# Altium footprint library Footprint.PcbLib: 154 footprints (part 1 of 10)
Each footprint in its own frame and in the unit in brackets; x right, y up, seen from the top. Pads: shape width x height; smd on the part's side, far side on the other; paste and mask are expansions set on the pad; w line width, h text height; cw(c..) or ccw(c..) is an arc to the next point about the centre after c.
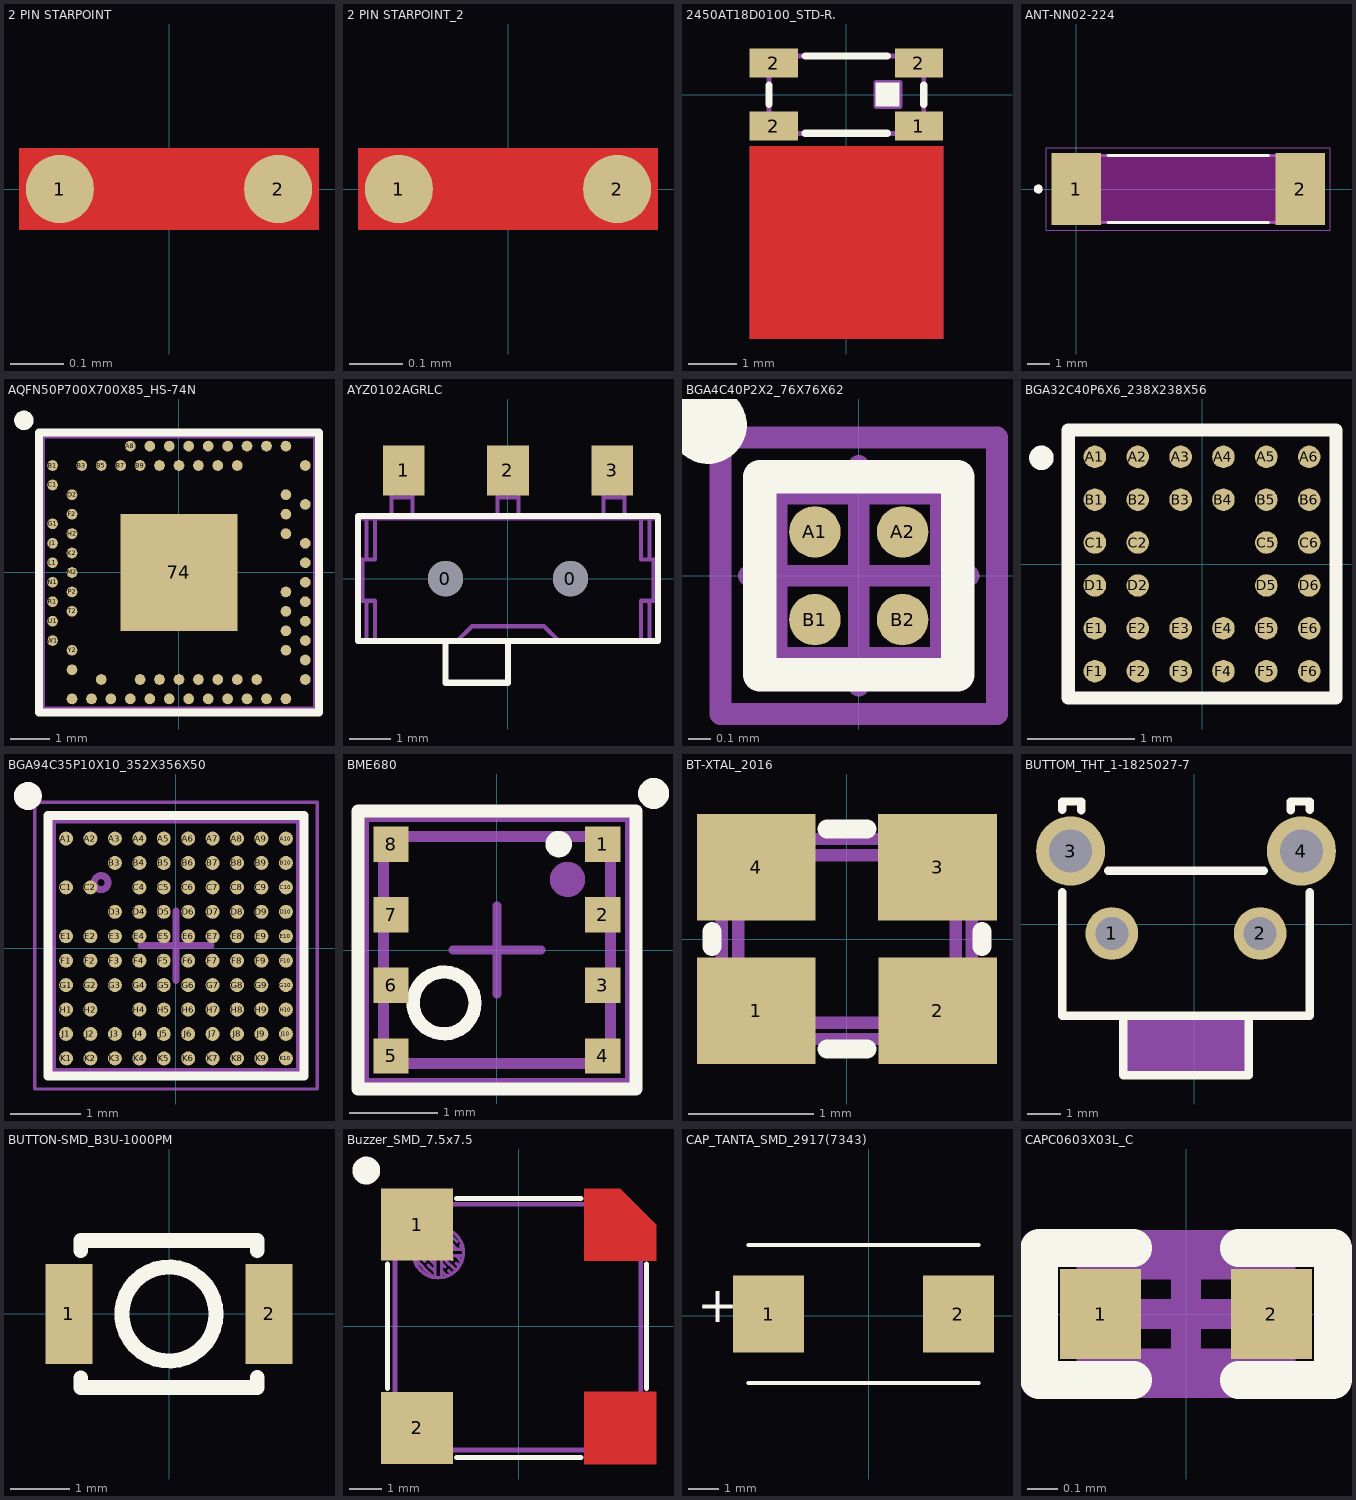
[diagram p0: the footprints below, top view; thin cyan lines are the x and y axes]

## 2 PIN STARPOINT [mil]
pads (2):
  round 5 smd paste-3 mask-3: 1(-8,0) 2(8,0)
Top Layer:
  rectangle: -11,-3 11,3

## 2 PIN STARPOINT_2 [mil]
pads (2):
  round 5 smd paste-3 mask-3: 1(-8,0) 2(8,0)
Top Layer:
  rectangle: -11,-3 11,3

## 2450AT18D0100_STD-R. [mm]
pads (4):
  rect 1x0.6 smd mask+0.051: 1(1.5,-0.65) 2(-1.5,-0.65) 2(-1.5,0.65) 2(1.5,0.65)
Top Layer:
  pour cut-out: 2,-5.05 2,-1.067 -2,-1.067 -2,-5.05
Mid-Layer 1:
  pour cut-out: 2.025,-5.05 2.025,-1.067 -1.975,-1.067 -1.975,-5.05
Mid-Layer 2:
  pour cut-out: 2.025,-5.05 2.025,-1.067 -1.975,-1.067 -1.975,-5.05
Bottom Layer:
  pour cut-out: 2,-5.05 2,-1.067 -2,-1.067 -2,-5.05
Top Overlay:
  region: 1.1,0.25 0.6,0.25 0.6,-0.25 1.1,-0.25
  lines w0.15: -1.6,-0.2 -1.6,0.2 ; -0.85,-0.8 0.85,-0.8 ; -0.85,0.8 0.85,0.8 ; 1.6,-0.2 1.6,0.2
Mechanical 7:
  lines w0.1: -1.6,-0.5 -1.1,-0.5 -1.1,-0.8 ; -1.6,0.5 -1.1,0.5 -1.1,0.8 ; 1.1,-0.8 1.1,-0.5 1.6,-0.5 ; 1.1,0.8 1.1,0.5 1.6,0.5 ; -1.6,-0.8 1.6,-0.8 1.6,0.8 -1.6,0.8 -1.6,-0.8 ; 0.607,-0.247 0.607,0.252 1.106,0.252 1.106,-0.247 0.607,-0.247
  text ".Designator" at -0.908,-0.2 h0.38
3D body: height 1.2, standoff 0, extent 1.105,0.505 1.605,0.805
3D body: height 1.2, standoff 0, extent -1.605,-0.805 -1.105,-0.505
3D body: height 1.2, standoff 0, extent -1.605,0.505 -1.105,0.805
3D body: height 1.2, standoff 0, extent -1.6,-0.8 1.6,0.8
3D body: height 1.2, standoff 0, extent 1.105,-0.805 1.605,-0.505
3D body: height 1.2, standoff 0.01, extent 0.6,-0.25 1.099,0.25

## ANT-NN02-224 [mm]
pads (2):
  rect 2.2x3.2 smd: 1(0,0) 2(10,0)
Top Overlay:
  circle w0.2: c-1.7,0 r0.1
  lines w0.127: 1.413,-1.5 8.587,-1.5 ; 1.413,1.5 8.587,1.5
Keep-Out Layer:
  region: 8.9,-1.5 1.1,-1.5 1.1,1.5 8.9,1.5
  region: 8.9,-1.5 1.1,-1.5 1.1,1.5 8.9,1.5
Mechanical 13:
  circle w0.2: c-1.7,0 r0.1
  lines w0.127: -1,-1.5 11,-1.5 11,1.5 -1,1.5 -1,-1.5
Mechanical 15:
  lines w0.05: -1.35,-1.85 11.35,-1.85 11.35,1.85 -1.35,1.85 -1.35,-1.85
3D body "step_temp.STEP": height 2.41, standoff 0, extent -1,-1.5 11,1.5

## AQFN50P700X700X85_HS-74N [mm]
pads (74):
  rect 3x3 smd mask+0.05: 74(0,0)
  round 0.275 smd paste+0.012 mask+0.05: A8(-1.25,3.25) A10(-0.75,3.25) A12(-0.25,3.25) A14(0.25,3.25) A16(0.75,3.25) A18(1.25,3.25) A20(1.75,3.25) A22(2.25,3.25) A23(2.75,3.25) AA24(3.25,-2.25) AB2(-2.75,-2.5) AC5(-2,-2.75) AC9(-1,-2.75) AC11(-0.5,-2.75) AC13(0,-2.75) AC15(0.5,-2.75) AC17(1,-2.75) AC19(1.5,-2.75) AC21(2,-2.75) AC24(3.25,-2.75) AD2(-2.75,-3.25) AD4(-2.25,-3.25) AD6(-1.75,-3.25) AD8(-1.25,-3.25) AD10(-0.75,-3.25) AD12(-0.25,-3.25) AD14(0.25,-3.25) AD16(0.75,-3.25) AD18(1.25,-3.25) AD20(1.75,-3.25) AD22(2.25,-3.25) AD23(2.75,-3.25) B1(-3.25,2.75) B3(-2.5,2.75) B5(-2,2.75) B7(-1.5,2.75) B9(-1,2.75) B11(-0.5,2.75) B13(0,2.75) B15(0.5,2.75) B17(1,2.75) B19(1.5,2.75) B24(3.25,2.75) C1(-3.25,2.25) D2(-2.75,2) D23(2.75,2) E24(3.25,1.75) F2(-2.75,1.5) F23(2.75,1.5) G1(-3.25,1.25) H2(-2.75,1) H23(2.75,1) J1(-3.25,0.75) J24(3.25,0.75) K2(-2.75,0.5) L1(-3.25,0.25) L24(3.25,0.25) M2(-2.75,0) N1(-3.25,-0.25) N24(3.25,-0.25) P2(-2.75,-0.5) P23(2.75,-0.5) R1(-3.25,-0.75) R24(3.25,-0.75) T2(-2.75,-1) T23(2.75,-1) U1(-3.25,-1.25) U24(3.25,-1.25) V23(2.75,-1.5) W1(-3.25,-1.75) W24(3.25,-1.75) Y2(-2.75,-2) Y23(2.75,-2)
Top Overlay:
  circle w0.25: c-3.988,3.912 r0.125
  lines w0.2: -3.6,-3.6 3.6,-3.6 3.6,3.6 -3.6,3.6 -3.6,-3.6
Mechanical 7:
  lines w0.1: -3.5,-3.5 -3.5,3.5 3.5,3.5 3.5,-3.5 -3.5,-3.5
3D body "LGA88C25P25X25_700X700X85.step": height 0.85, standoff 0, extent -3.55,-3.55 3.55,3.55

## AYZ0102AGRLC [mm]
pads (5):
  round 0.85 hole 0.85 unplated: 0(-1.5,0) 0(1.5,0)
  rect 1x1.2 smd: 1(-2.5,2.6) 2(0,2.6) 3(2.5,2.6)
Top Overlay:
  lines w0.15: -1.5,-1.5 -1.5,-2.5 0,-2.5 0,-1.5 ; -3.6,-1.5 -3.6,1.5 3.6,1.5 3.6,-1.5 -3.6,-1.5
Mechanical 7:
  lines w0.1: -3.395,-1.52 -3.395,-0.531 ; -3.395,0.457 -3.395,1.445 ; -3.191,-1.52 -3.191,-0.531 -3.497,-0.531 ; -3.191,1.445 -3.191,0.457 -3.497,0.457 ; -2.797,1.445 -2.797,2.727 -2.288,2.727 -2.288,1.445 ; -2.797,1.948 -2.288,1.948 ; -1.5,-1.52 -1.5,-2.5 0.001,-2.5 0.001,-1.52 ; -1.246,-1.52 -0.864,-1.143 0.866,-1.143 1.247,-1.52 ; -0.253,1.445 -0.253,2.727 0.255,2.727 0.255,1.445 ; -0.253,1.948 0.255,1.948 ; 2.291,1.445 2.291,2.727 2.799,2.727 2.799,1.445 ; 2.291,1.948 2.799,1.948 ; 3.193,-1.52 3.193,-0.531 3.499,-0.531 ; 3.193,1.445 3.193,0.457 3.499,0.457 ; 3.397,-1.52 3.397,-0.531 ; 3.397,0.457 3.397,1.445 ; -3.497,-0.531 -3.599,-0.531 -3.599,-1.52 3.6,-1.52 3.6,-0.531 3.499,-0.531 ; -3.497,-0.531 -3.497,0.457 ; -3.497,0.457 -3.599,0.457 -3.599,1.445 3.6,1.445 3.6,0.457 3.499,0.457 ; 3.499,-0.531 3.499,0.457
  text ".Designator" at -1.125,-0.15 h0.38
3D body "AYZ0102AGRLC.step": height 1.5, standoff -0.5, extent -3.6,-2.5 3.6,2.8

## BGA4C40P2X2_76X76X62 [mm]
pads (4):
  round 0.235 smd mask+0.05: A1(-0.2,0.2) A2(0.2,0.2) B1(-0.2,-0.2) B2(0.2,-0.2)
Top Overlay:
  circle w0.254: c-0.687,0.687 r0.05
  lines w0.152: -0.451,-0.451 -0.451,0.451 0.451,0.451 0.451,-0.451 -0.451,-0.451
Mechanical 7:
  circle w0.127: c-0.2,0.2 r0.051
  lines w0.1: -0.375,-0.375 0.375,-0.375 0.375,0.375 -0.375,0.375 -0.375,-0.375
  text ".Designator" at -0.374,0.505 h0.38
Mechanical 15:
  lines w0.1: -0.5,0 0.5,0 ; 0,-0.5 0,0.5 ; -0.63,-0.63 0.63,-0.63 0.63,0.63 -0.63,0.63 -0.63,-0.63
3D body "TCK106AG,LF.step": height 0.55, standoff 0, extent -0.395,-0.395 0.395,0.395

## BGA32C40P6X6_238X238X56 [mm]
pads (32):
  round 0.21 smd mask+0.03: A1(-1,1) A2(-0.6,1) A3(-0.2,1) A4(0.2,1) A5(0.6,1) A6(1,1) B1(-1,0.6) B2(-0.6,0.6) B3(-0.2,0.6) B4(0.2,0.6) B5(0.6,0.6) B6(1,0.6) C1(-1,0.2) C2(-0.6,0.2) C5(0.6,0.2) C6(1,0.2) D1(-1,-0.2) D2(-0.6,-0.2) D5(0.6,-0.2) D6(1,-0.2) E1(-1,-0.6) E2(-0.6,-0.6) E3(-0.2,-0.6) E4(0.2,-0.6) E5(0.6,-0.6) E6(1,-0.6) F1(-1,-1) F2(-0.6,-1) F3(-0.2,-1) F4(0.2,-1) F5(0.6,-1) F6(1,-1)
Top Overlay:
  circle w0.127: c-1.499,0.991 r0.051
  lines w0.125: -1.25,-1.25 1.25,-1.25 1.25,1.25 -1.25,1.25 -1.25,-1.25
3D body "BGA32C40P6X6_238X238X56.step": height 0.56, standoff 0, extent -1.19,-1.19 1.19,1.19

## BGA94C35P10X10_352X356X50 [mm]
pads (94):
  round 0.2 smd mask+0.04: A1(-1.575,1.575) A2(-1.225,1.575) A3(-0.875,1.575) A4(-0.525,1.575) A5(-0.175,1.575) A6(0.175,1.575) A7(0.525,1.575) A8(0.875,1.575) A9(1.225,1.575) A10(1.575,1.575) B3(-0.875,1.225) B4(-0.525,1.225) B5(-0.175,1.225) B6(0.175,1.225) B7(0.525,1.225) B8(0.875,1.225) B9(1.225,1.225) B10(1.575,1.225) C1(-1.575,0.875) C2(-1.225,0.875) C4(-0.525,0.875) C5(-0.175,0.875) C6(0.175,0.875) C7(0.525,0.875) C8(0.875,0.875) C9(1.225,0.875) C10(1.575,0.875) D3(-0.875,0.525) D4(-0.525,0.525) D5(-0.175,0.525) D6(0.175,0.525) D7(0.525,0.525) D8(0.875,0.525) D9(1.225,0.525) D10(1.575,0.525) E1(-1.575,0.175) E2(-1.225,0.175) E3(-0.875,0.175) E4(-0.525,0.175) E5(-0.175,0.175) E6(0.175,0.175) E7(0.525,0.175) E8(0.875,0.175) E9(1.225,0.175) E10(1.575,0.175) F1(-1.575,-0.175) F2(-1.225,-0.175) F3(-0.875,-0.175) F4(-0.525,-0.175) F5(-0.175,-0.175) F6(0.175,-0.175) F7(0.525,-0.175) F8(0.875,-0.175) F9(1.225,-0.175) F10(1.575,-0.175) G1(-1.575,-0.525) G2(-1.225,-0.525) G3(-0.875,-0.525) G4(-0.525,-0.525) G5(-0.175,-0.525) G6(0.175,-0.525) G7(0.525,-0.525) G8(0.875,-0.525) G9(1.225,-0.525) G10(1.575,-0.525) H1(-1.575,-0.875) H2(-1.225,-0.875) H4(-0.525,-0.875) H5(-0.175,-0.875) H6(0.175,-0.875) H7(0.525,-0.875) H8(0.875,-0.875) H9(1.225,-0.875) H10(1.575,-0.875) J1(-1.575,-1.225) J2(-1.225,-1.225) J3(-0.875,-1.225) J4(-0.525,-1.225) J5(-0.175,-1.225) J6(0.175,-1.225) J7(0.525,-1.225) J8(0.875,-1.225) J9(1.225,-1.225) J10(1.575,-1.225) K1(-1.575,-1.575) K2(-1.225,-1.575) K3(-0.875,-1.575) K4(-0.525,-1.575) K5(-0.175,-1.575) K6(0.175,-1.575) K7(0.525,-1.575) K8(0.875,-1.575) K9(1.225,-1.575) K10(1.575,-1.575)
Top Overlay:
  circle w0.2: c-2.122,2.184 r0.1
  lines w0.125: -1.834,-1.826 1.835,-1.826 1.835,1.906 -1.834,1.906 -1.834,-1.826
Mechanical 7:
  circle w0.1: c-1.072,0.944 r0.1
  lines w0.1: -1.772,-1.763 -1.772,1.844 1.772,1.844 1.772,-1.763 -1.772,-1.763
  text ".Designator" at -0.7,-0.135 h0.38
Mechanical 15:
  lines w0.05: -2.022,-2.013 -2.022,2.094 2.022,2.094 2.022,-2.013 -2.022,-2.013
  lines w0.1: -0.5,0.04 0.5,0.04 ; 0,-0.46 0,0.54
3D body "Graviton CSP.step": height 0.47, standoff 0, extent -1.772,-1.763 1.772,1.844

## BME680 [mm]
pads (8):
  rect 0.4x0.4 smd mask+0.1: 1(1.2,1.2) 2(1.2,0.4) 3(1.2,-0.4) 4(1.2,-1.2) 5(-1.2,-1.2) 6(-1.2,-0.4) 7(-1.2,0.4) 8(-1.2,1.2)
Top Overlay:
  circle w0.15: c0.7,1.2 r0.075
  circle w0.15: c-0.6,-0.6 r0.35
  circle w0.25: c1.775,1.775 r0.05
  lines w0.15: -1.575,-1.575 -1.575,1.575 1.575,1.575 1.575,-1.575 -1.575,-1.575
Mechanical 7:
  circle w0.1: c-0.6,-0.6 r0.35
  circle w0.2: c0.8,0.8 r0.1
  lines w0.1: -1.5,-1.5 -1.5,1.5 1.5,1.5 1.5,-1.5 -1.5,-1.5 ; -1.3,-1.3 1.3,-1.3 1.3,1.3 -1.3,1.3 -1.3,-1.3
  text ".Designator" at -0.7,0.05 h0.38
Mechanical 15:
  lines w0.05: -1.25,-1.25 1.25,-1.25 1.25,1.25 -1.25,1.25 -1.25,-1.25
  lines w0.1: -0.5,0 0.5,0 ; 0,-0.5 0,0.5
3D body "BME680.step": height 0.93, standoff 0, extent -1.5,-1.5 1.5,1.5

## BT-XTAL_2016 [mm]
pads (4):
  rect 0.95x0.85 smd: 1(-0.725,-0.575) 2(0.725,-0.575) 3(0.725,0.575) 4(-0.725,0.575)
Top Overlay:
  lines w0.152: -1.08,-0.06 -1.08,0.06 ; -0.16,-0.88 0.16,-0.88 ; -0.16,0.88 0.16,0.88 ; 1.08,-0.06 1.08,0.06
Mechanical 7:
  lines w0.1: -1,-0.7 cw(c-1,-0.8) -0.9,-0.8 0.9,-0.8 cw(c1,-0.8) 1,-0.7 1,0.7 cw(c1,0.8) 0.9,0.8 -0.9,0.8 cw(c-1,0.8) -1,0.7 -1,-0.7 ; -0.87,-0.57 ccw(c-0.77,-0.57) -0.77,-0.67 0.77,-0.67 ccw(c0.77,-0.57) 0.87,-0.57 0.87,0.57 ccw(c0.77,0.57) 0.77,0.67 -0.77,0.67 ccw(c-0.77,0.57) -0.87,0.57 -0.87,-0.57
  text ".Designator" at -0.7,-0.2 h0.38
3D body: height 0.56, standoff 0.15, extent -0.7,-0.65 0.7,0.65
3D body "User Library-GeyerElectronics_KX5.step": height 0.56, standoff 0, extent -1.05,-0.85 1.05,0.85

## BUTTOM_THT_1-1825027-7 [mm]
pads (4):
  round 1.6 hole 1 paste-2539.97 mask+0.05: 1(-2.501,-0.272) 2(1.999,-0.272)
  round 2.1 hole 1.3 paste-2539.97 mask+0.05: 3(-3.751,2.228) 4(3.249,2.228)
Top Overlay:
  lines w0.254: -4.001,0.972 -4.001,-2.772 3.499,-2.772 3.499,0.972 ; -4,3.485 -4,3.696 -4,3.728 -3.426,3.728 -3.426,3.467 ; -2.616,1.633 2.115,1.633 ; -2.151,-2.772 -2.151,-4.572 1.649,-4.572 1.649,-2.772 ; 2.924,3.467 2.924,3.728 3.499,3.728 3.499,3.484
Mechanical 15:
  region: -2.155,-2.705 1.655,-2.705 1.655,-4.61 -2.155,-4.61 -2.155,-4.483
3D body "c-1-1825027-7-g-3d.stp": height 7, standoff -3.52, extent -4.458,-7.112 3.95,3.747

## BUTTON-SMD_B3U-1000PM [mm]
pads (2):
  rect 0.8x1.7 smd paste+0 mask+0.051: 1(-1.7,0) 2(1.7,0)
Top Overlay:
  circle w0.254: c0,0 r0.8
  lines w0.254: -1.5,-1.087 -1.5,-1.25 ; -1.5,1.081 -1.5,1.25 ; 1.5,-1.081 1.5,-1.25 ; 1.5,1.081 1.5,1.25 ; -1.5,-1.25 1.5,-1.25 ; -1.5,-1.25 1.5,-1.25 ; -1.5,1.25 1.5,1.25 ; -1.5,1.25 1.5,1.25
3D body "User Library-OMRON B3U1000P.step": height 1.6, standoff 0, extent -1.992,-1.205 2.008,1.295

## Buzzer_SMD_7.5x7.5 [mm]
pads (2):
  rect 2.2x2.2 smd: 1(-3.1,3.1) 2(-3.1,-3.1)
Top Layer:
  region: 2,-4.2 4.2,-4.2 4.2,-2 2,-2
  region: 2,2 2,4.2 3.1,4.2 4.2,3.1 4.2,2
Top Overlay:
  circle w0.45: c-4.65,4.75 r0.2
  lines w0.15: -4,-1.9 -4,1.9 ; -1.9,-4 1.9,-4 ; -1.9,3.9 1.9,3.9 ; 3.9,-1.9 3.9,1.9
Mechanical 7:
  drawing of 216 lines, arcs and shapes, not listed
  text ".Designator" at -0.1,-0.1 h0.38
Mechanical 15:
  lines w0.1: -3.8,-3.8 -3.8,3.7 2.2,3.7 3.7,2.2 3.7,-3.8 -3.8,-3.8
3D body "Buzzer7.5x7.5.step": height 2.5, standoff 0, extent -3.758,-3.75 3.75,3.75

## CAP_TANTA_SMD_2917(7343) [mm]
pads (2):
  rect 2.31x2.52 smd: 1(-3.278,0.051) 2(2.922,0.051)
Top Overlay:
  lines w0.127: -3.928,-2.199 3.572,-2.199 ; -3.928,2.301 3.572,2.301
  text "+" at -5.613,-0.61 h2
Mechanical 13:
  lines w0.127: -3.928,-2.199 3.572,-2.199 ; -3.928,2.301 3.572,2.301
3D body "CAP_TCJ_E_KYO.step": height 4.34, standoff 0, extent -4.076,-2.197 3.416,2.299

## CAPC0603X03L_C [mm]
pads (2):
  rect 0.27x0.3 smd mask+0.025: 1(-0.285,0) 2(0.285,0)
Top Overlay:
  lines w0.125: -0.175,-0.22 -0.49,-0.22 -0.49,0.22 -0.175,0.22 ; 0.175,-0.22 0.49,-0.22 0.49,0.22 0.175,0.22
Mechanical 7:
  lines w0.1: -0.315,-0.165 -0.315,0.165 0.315,0.165 0.315,-0.165 -0.315,-0.165
  text ".Designator" at -0.306,0.268 h0.3
Mechanical 15:
  lines w0.1: -0.165,0 0.165,0 ; 0,-0.165 0,0.165 ; -0.5,-0.23 -0.5,0.23 0.5,0.23 0.5,-0.23 -0.5,-0.23
3D body "User Library-0201(0603M) Cap.step": height 0.3, standoff -0.01, extent -0.305,-0.152 0.305,0.153